# Altium schematic symbol library TWOTREES_TMC2209_V20.SchLib: 1 symbol
Pins are listed as number, name and electrical type; pins without a type are passive.

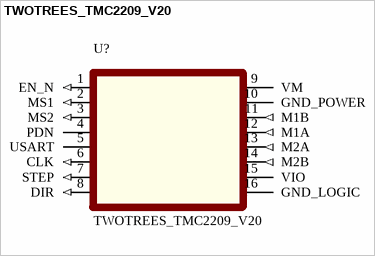
[diagram p0: symbol TWOTREES_TMC2209_V20]

## TWOTREES_TMC2209_V20
designator U?
TWOTREES TMC2209 V2.0 module, as photographed. PDN and USART separate; mechanical study Rev B.; MechanicalStatus: NOMINAL_DIMENSIONS_VERIFY_PHYSICAL_MODULE
footprint TWOTREES_TMC2209_V20_2X8 (Native PcbLib footprint with embedded STEP)
pins: 1 EN_N (in), 2 MS1 (in), 3 MS2 (in), 4 PDN, 5 USART, 6 CLK (in), 7 STEP (in), 8 DIR (in), 9 VM (power), 10 GND_POWER (power), 11 M1B (out), 12 M1A (out), 13 M2A (out), 14 M2B (out), 15 VIO (power), 16 GND_LOGIC (power)